# Altium schematic symbol library C_4uF7.SchLib: 1 symbol
Pins are listed as number, name and electrical type; pins without a type are passive.

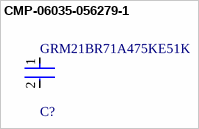
[diagram p0: symbol CMP-06035-056279-1]

## CMP-06035-056279-1
designator C?, comment GRM21BR71A475KE51K
Chip Multilayer Ceramic Capacitors for General Purpose, 0805, 4.7uF, X7R, 15%, 10%, 10V; Dielectric: X7R; Case/Package: 0805; Voltage Rating (DC): 10V; Thickness: 1.25mm; Capacitance: 4.7uF; Tolerance: 10%; Length: 2mm; Width: 1.25mm
footprint FP-GRM21B-0_15-MFG
footprint FP-GRM21B-0_15-IPC_C
footprint FP-GRM21B-0_15-IPC_B
footprint FP-GRM21B-0_15-IPC_A
pins: 1, 2